# Altium footprint library PcbLib1.PcbLib: 42 footprints (part 2 of 3)
Each footprint in its own frame and in the unit in brackets; x right, y up, seen from the top. Pads: shape width x height; smd on the part's side, far side on the other; paste and mask are expansions set on the pad; w line width, h text height; cw(c..) or ccw(c..) is an arc to the next point about the centre after c.
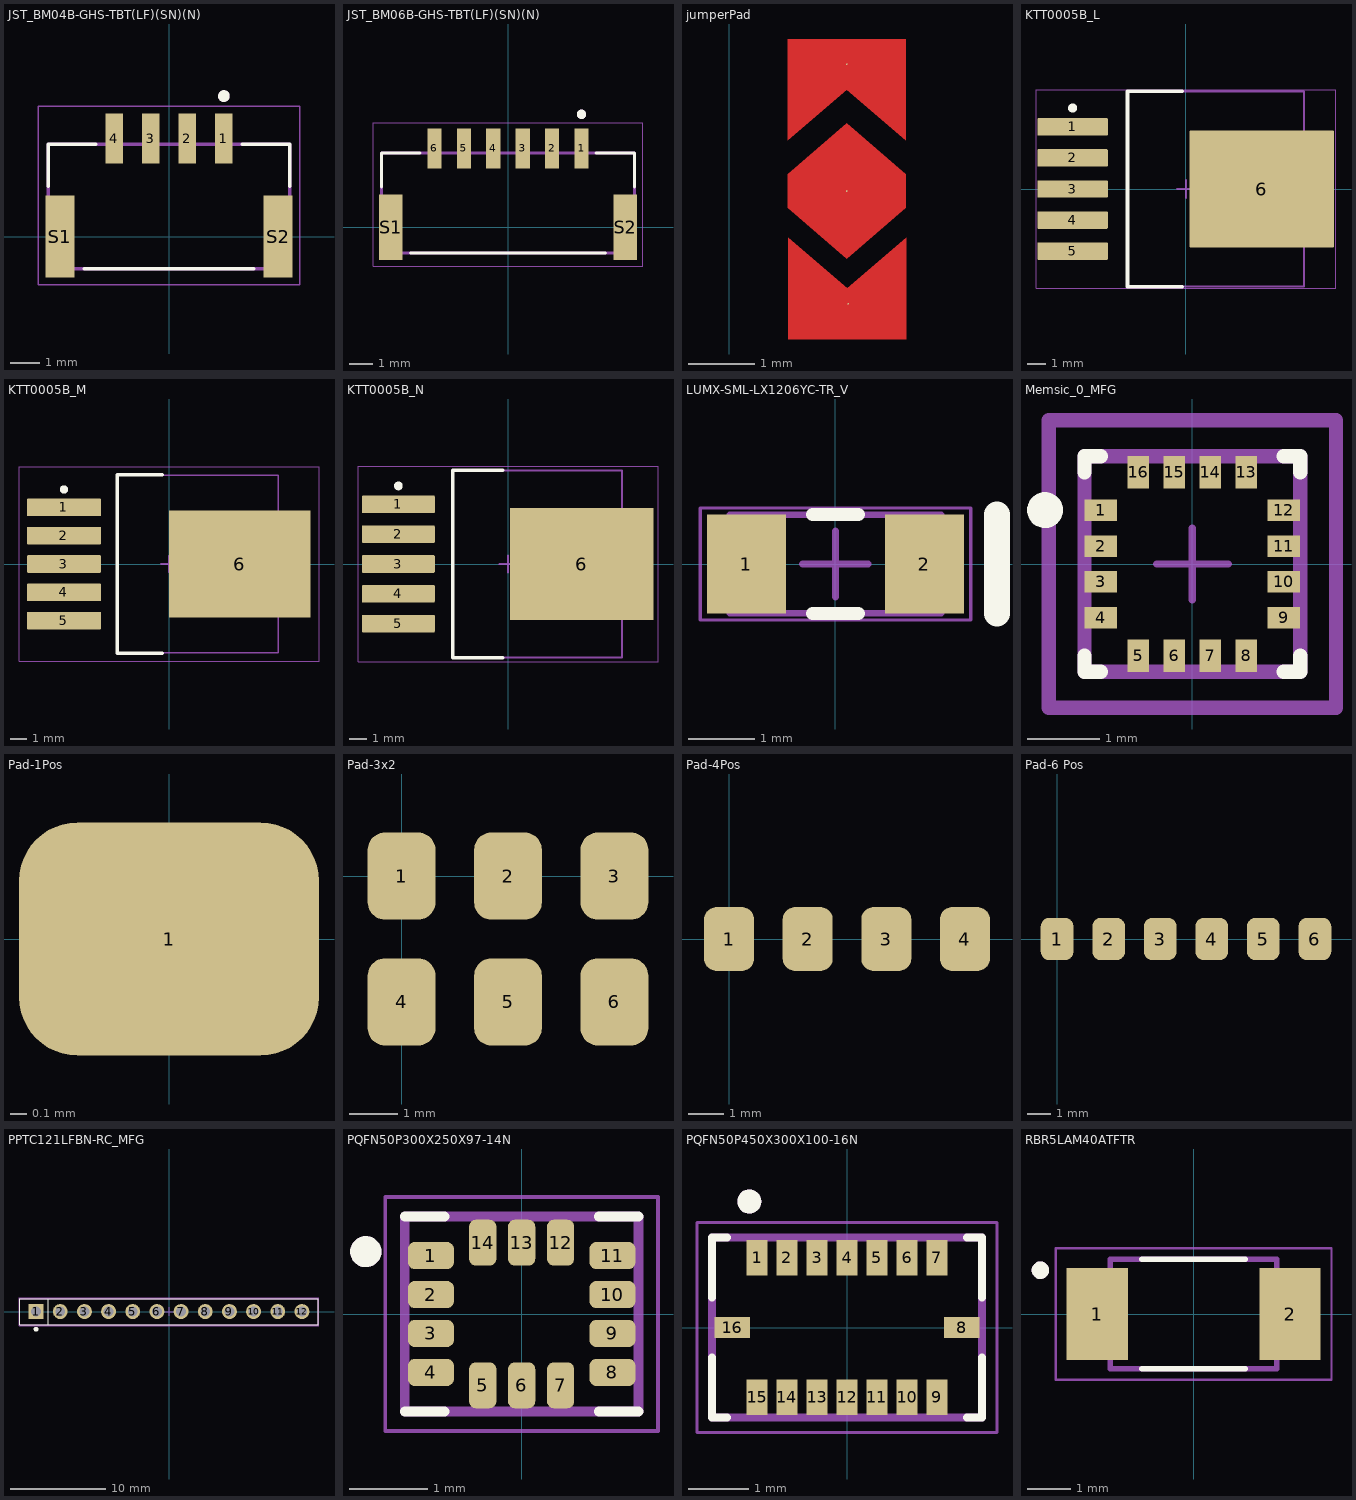
[diagram p1: the footprints below, top view; thin cyan lines are the x and y axes]

## JST_BM04B-GHS-TBT(LF)(SN)(N) [mm]
height 4.05
pads (6):
  rect 0.6x1.7 smd: 1(1.875,3.35) 2(0.625,3.35) 3(-0.625,3.35) 4(-1.875,3.35)
  rect 1x2.8 smd: S1(-3.725,0) S2(3.725,0)
Top Overlay:
  circle w0.2: c1.875,4.8 r0.1
  lines w0.127: -4.125,1.72 -4.125,3.15 -2.5,3.15 ; -2.9,-1.1 2.9,-1.1 ; 2.5,3.15 4.125,3.15 4.125,1.72
Mechanical 13:
  circle w0.2: c1.875,4.8 r0.1
  lines w0.127: -4.125,-1.1 4.125,-1.1 4.125,3.15 -4.125,3.15 -4.125,-1.1
Mechanical 15:
  lines w0.05: -4.475,-1.65 4.475,-1.65 4.475,4.45 -4.475,4.45 -4.475,-1.65
3D body "SM04B-GHS-TB(LF)(SN)---3DModel-STEP-56544.STEP": height 4.35, standoff 0, extent -4.125,-1.15 4.125,3.7

## JST_BM06B-GHS-TBT(LF)(SN)(N) [mm]
height 4.05
pads (8):
  rect 0.6x1.7 smd: 1(3.125,3.35) 2(1.875,3.35) 3(0.625,3.35) 4(-0.625,3.35) 5(-1.875,3.35) 6(-3.125,3.35)
  rect 1x2.8 smd: S1(-4.975,0) S2(4.975,0)
Top Overlay:
  circle w0.2: c3.125,4.8 r0.1
  lines w0.127: -5.375,1.72 -5.375,3.15 -3.75,3.15 ; -4.15,-1.1 4.15,-1.1 ; 3.75,3.15 5.375,3.15 5.375,1.72
Mechanical 13:
  circle w0.2: c3.125,4.8 r0.1
  lines w0.127: -5.375,-1.1 5.375,-1.1 5.375,3.15 -5.375,3.15 -5.375,-1.1
Mechanical 15:
  lines w0.05: -5.725,-1.65 5.725,-1.65 5.725,4.45 -5.725,4.45 -5.725,-1.65
3D body "SM06B-GHS-TB(LF)(SN)--3DModel-STEP-56544.STEP": height 4.07, standoff -0.18, extent -5.375,-1.1 5.375,3.75

## jumperPad [mil]
pads (3):
  round 1 smd: 1(70.27,42.82) 2(69.46,109.56) 3(69.46,184.56)
Top Layer:
  region: 34.46,139.56 69.46,169.56 104.46,139.56 104.46,199.56 34.46,199.56
  region: 104.79,81.99 69.79,51.99 34.79,81.99 34.79,21.99 104.79,21.99
  region: 104.46,99.56 69.46,69.56 34.46,99.56 34.46,119.56 69.46,149.56 104.46,119.56

## KTT0005B_L [mm] "DPAK, 5-Leads, Body 10.65x9.65mm, Pitch 1.7mm, IPC High Density"
height 4.83
pads (6):
  rrect11% 3.85x0.95 smd: 1(-6.2,3.4) 2(-6.2,1.7) 3(-6.2,0) 4(-6.2,-1.7) 5(-6.2,-3.4)
  rrect2% 7.9x6.4 smd: 6(4.15,0)
Top Overlay:
  circle w0.25: c-6.2,4.425 r0.125
  lines w0.2: -0.2,-5.35 -3.2,-5.35 -3.2,5.35 -0.2,5.35
Mechanical 1:
  text ".Designator" at -1.905,-0.508 h1.3
Mechanical 13:
  lines w0.1: -3.2,-5.325 -3.2,5.325 6.45,5.325 6.45,-5.325 -3.2,-5.325
Mechanical 15:
  lines w0.05: -8.2,-5.425 -8.2,5.425 8.2,5.425 8.2,-5.425 -8.2,-5.425
  lines w0.1: -0.5,0 0.5,0 ; 0,-0.5 0,0.5
3D body "LM2596S-5.0_NOPB.stp": height 4.57, standoff -0.15, extent -7.302,-5.08 7.048,5.08

## KTT0005B_M [mm] "DPAK, 5-Leads, Body 10.65x9.65mm, Pitch 1.7mm, IPC Low Density"
height 4.83
pads (6):
  rrect10% 4.45x1.05 smd: 1(-6.3,3.4) 2(-6.3,1.7) 3(-6.3,0) 4(-6.3,-1.7) 5(-6.3,-3.4)
  rrect2% 8.5x6.45 smd: 6(4.25,0)
Top Overlay:
  circle w0.25: c-6.3,4.475 r0.125
  lines w0.2: -0.4,-5.35 -3.1,-5.35 -3.1,5.35 -0.4,5.35
Mechanical 1:
  text ".Designator" at -1.905,-0.635 h1.3
Mechanical 13:
  lines w0.1: -3.1,-5.325 6.55,-5.325 6.55,5.325 -3.1,5.325 -3.1,-5.325
Mechanical 15:
  lines w0.05: -9,-5.825 9,-5.825 9,5.825 -9,5.825 -9,-5.825
  lines w0.1: -0.5,0 0.5,0 ; 0,-0.5 0,0.5
3D body "LM2596S-5.0_NOPB.stp": height 4.57, standoff -0.15, extent -7.302,-5.08 7.048,5.08

## KTT0005B_N [mm] "DPAK, 5-Leads, Body 10.65x9.65mm, Pitch 1.7mm, IPC Medium Density"
height 4.83
pads (6):
  rrect10% 4.15x1 smd: 1(-6.25,3.4) 2(-6.25,1.7) 3(-6.25,0) 4(-6.25,-1.7) 5(-6.25,-3.4)
  rrect2% 8.2x6.4 smd: 6(4.2,0)
Top Overlay:
  circle w0.25: c-6.25,4.45 r0.125
  lines w0.2: -0.3,-5.35 -3.15,-5.35 -3.15,5.35 -0.3,5.35
Mechanical 1:
  text ".Designator" at -1.905,-0.508 h1.3
Mechanical 13:
  lines w0.1: -3.15,-5.325 6.5,-5.325 6.5,5.325 -3.15,5.325 -3.15,-5.325
Mechanical 15:
  lines w0.05: -8.55,-5.575 8.55,-5.575 8.55,5.575 -8.55,5.575 -8.55,-5.575
  lines w0.1: -0.5,0 0.5,0 ; 0,-0.5 0,0.5
3D body "LM2596S-5.0_NOPB.stp": height 4.57, standoff -0.15, extent -7.175,-5.08 7.175,5.08

## LUMX-SML-LX1206YC-TR_V [mm] "SMD, 2-Leads, Body 3.2x1.5mm"
height 1.25
pads (2):
  rect 1.2x1.5 smd: 1(-1.35,0) 2(1.35,0)
Top Overlay:
  lines w0.2: -0.35,-0.75 0.35,-0.75 ; -0.35,0.75 0.35,0.75
  lines w0.4: 2.45,-0.75 2.45,0.75
Mechanical 13:
  lines w0.1: -1.6,-0.75 1.6,-0.75 1.6,0.75 -1.6,0.75 -1.6,-0.75
Mechanical 15:
  lines w0.05: -2.05,-0.85 -2.05,0.85 2.05,0.85 2.05,-0.85 -2.05,-0.85
  lines w0.1: -0.5,0 0.5,0 ; 0,-0.5 0,0.5
3D body "SML-LX1206YC-TR--3DModel-STEP-269445.STEP": height 1.1, standoff 0, extent -1.6,-0.75 1.6,0.75

## Memsic_0_MFG [mm]
pads (16):
  rect 0.45x0.3 smd paste+0 mask+0: 1(-1.275,0.75) 2(-1.275,0.25) 3(-1.275,-0.25) 4(-1.275,-0.75) 9(1.275,-0.75) 10(1.275,-0.25) 11(1.275,0.25) 12(1.275,0.75)
  rect 0.3x0.45 smd paste+0 mask+0: 5(-0.75,-1.275) 6(-0.25,-1.275) 7(0.25,-1.275) 8(0.75,-1.275) 13(0.75,1.275) 14(0.25,1.275) 15(-0.25,1.275) 16(-0.75,1.275)
Top Overlay:
  circle w0.25: c-2.05,0.75 r0.125
  lines w0.2: -1.5,-1.275 -1.5,-1.5 -1.275,-1.5 ; -1.5,1.275 -1.5,1.5 -1.275,1.5 ; 1.275,-1.5 1.5,-1.5 1.5,-1.275 ; 1.275,1.5 1.5,1.5 1.5,1.275
Mechanical 10:
  lines w0.2: -2,-2 2,-2 2,2 -2,2 -2,-2
  text ".Designator" at 0,0.188 h1
Bottom Designator:
  lines w0.2: -1.5,-1.5 1.5,-1.5 1.5,1.5 -1.5,1.5 -1.5,-1.5
Mechanical 15:
  lines w0.1: -0.5,0 0.5,0 ; 0,-0.5 0,0.5
  lines w0.2: -2,-2 2,-2 2,2 -2,2 -2,-2
3D body "IC_Memsic_MMC5983MA_eec.STEP": height 0.25, standoff 0, extent -2,-2 2,2

## Pad-1Pos [mm]
pads (1):
  rrect50% 1.8x1.4 smd: 1(0,0)

## Pad-3x2 [mm]
pads (6):
  rrect50% 1.4x1.8 smd: 1(0,0) 2(2.2,0) 3(4.4,0) 4(0,-2.6) 5(2.2,-2.6) 6(4.4,-2.6)

## Pad-4Pos [mm]
pads (4):
  rrect50% 1.4x1.8 smd: 1(0,0) 2(2.2,0) 3(4.4,0) 4(6.6,0)

## Pad-6 Pos [mm]
pads (6):
  rrect50% 1.4x1.8 smd: 1(0,0) 2(2.2,0) 3(4.4,0) 4(6.6,0) 5(8.8,0) 6(11,0)

## PPTC121LFBN-RC_MFG [mm] "Recommended Land Pattern"
height 8.7
pads (12):
  rect 1.57x1.57 hole 1.02: 1(-13.97,0)
  round 1.57 hole 1.02: 2(-11.43,0) 3(-8.89,0) 4(-6.35,0) 5(-3.81,0) 6(-1.27,0) 7(1.27,0) 8(3.81,0) 9(6.35,0) 10(8.89,0) 11(11.43,0) 12(13.97,0)
Top Overlay:
  circle w0.25: c-13.97,-1.85 r0.125
  lines w0.127: -12.7,-1.37 -12.7,1.37 ; -15.665,-1.37 15.665,-1.37 15.665,1.37 -15.665,1.37 -15.665,-1.37
Top Courtyard:
  lines w0.05: -15.765,-1.47 15.765,-1.47 15.765,1.47 -15.765,1.47 -15.765,-1.47
Top Assembly:
  lines w0.1: -15.665,-1.37 15.665,-1.37 15.665,1.37 -15.665,1.37 -15.665,-1.37
Top Designator:
  text ".Designator" at 0,0.188 h1
Top Component Center:
  lines w0.1: -0.441,0 0.441,0 ; 0,-0.441 0,0.441
3D body "PPTC121LFBN-RC.STEP": height 0.25, standoff 0, extent -15.765,-1.47 15.765,1.47

## PQFN50P300X250X97-14N [mm]
pads (14):
  rrect50% 0.59x0.35 smd mask+0: 1(-1.165,0.75) 2(-1.165,0.25) 3(-1.165,-0.25) 4(-1.165,-0.75) 8(1.165,-0.75) 9(1.165,-0.25) 10(1.165,0.25) 11(1.165,0.75)
  rrect50% 0.35x0.59 smd mask+0: 5(-0.5,-0.915) 6(0,-0.915) 7(0.5,-0.915) 12(0.5,0.915) 13(0,0.915) 14(-0.5,0.915)
Top Overlay:
  circle w0.2: c-2,0.8 r0.1
  lines w0.127: -1.5,-1.25 -0.99,-1.25 ; -1.5,1.25 -0.99,1.25 ; 0.99,-1.25 1.5,-1.25 ; 0.99,1.25 1.5,1.25
Top Solder:
  drawing of 14 lines, arcs and shapes, not listed
Mechanical 13:
  circle w0.2: c-2,0.8 r0.1
  lines w0.127: -1.5,-1.25 1.5,-1.25 1.5,1.25 -1.5,1.25 -1.5,-1.25
Mechanical 15:
  lines w0.05: -1.75,-1.5 1.75,-1.5 1.75,1.5 -1.75,1.5 -1.75,-1.5
3D body "ICM-42688-P--3DModel-STEP-1.STEP": height 0.97, standoff 0, extent -1.5,-1.25 1.5,1.25

## PQFN50P450X300X100-16N [mm]
pads (16):
  rect 0.35x0.59 smd: 1(-1.5,1.165) 2(-1,1.165) 3(-0.5,1.165) 4(0,1.165) 5(0.5,1.165) 6(1,1.165) 7(1.5,1.165) 9(1.5,-1.165) 10(1,-1.165) 11(0.5,-1.165) 12(0,-1.165) 13(-0.5,-1.165) 14(-1,-1.165) 15(-1.5,-1.165)
  rect 0.59x0.35 smd: 8(1.915,0) 16(-1.915,0)
Top Overlay:
  circle w0.2: c-1.629,2.1 r0.1
  lines w0.127: -2.25,-0.5 -2.25,-1.5 -2,-1.5 ; -2.25,0.5 -2.25,1.5 -2,1.5 ; 2,-1.5 2.25,-1.5 2.25,-0.5 ; 2,1.5 2.25,1.5 2.25,0.5
Mechanical 13:
  circle w0.2: c-1.629,2.1 r0.1
  lines w0.127: -2.25,-1.5 2.25,-1.5 2.25,1.5 -2.25,1.5 -2.25,-1.5
Mechanical 15:
  lines w0.05: -2.5,-1.75 2.5,-1.75 2.5,1.75 -2.5,1.75 -2.5,-1.75
3D body "BMI088--3DModel-STEP-56544.STEP": height 1, standoff 0, extent -2.25,-1.5 2.25,1.5

## RBR5LAM40ATFTR [mm]
pads (2):
  rect 1.4x2.1 smd paste-0.1: 1(-2.2,0) 2(2.2,0)
Top Overlay:
  circle w0.2: c-3.5,1 r0.1
  lines w0.127: -1.18,-1.25 1.18,-1.25 ; -1.18,1.25 1.18,1.25
Mechanical 13:
  circle w0.2: c-3.5,1 r0.1
  lines w0.127: -1.9,-1.25 1.9,-1.25 1.9,1.25 -1.9,1.25 -1.9,-1.25
Mechanical 15:
  lines w0.05: -3.15,-1.5 3.15,-1.5 3.15,1.5 -3.15,1.5 -3.15,-1.5
3D body "RBR5LAM40ATFTR.STEP": height 1.05, standoff 0, extent -2.4,-1.25 2.3,1.25